# Altium schematic symbol library TSW-104-08-G-D-RA.SchLib: 1 symbol
Pins are listed as number, name and electrical type; pins without a type are passive.

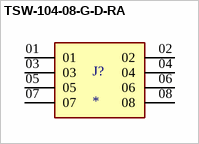
[diagram p0: symbol TSW-104-08-G-D-RA]

## TSW-104-08-G-D-RA
designator J?
MP: TSW-104-08-G-D-RA; MF: Samtec; Package: None; Value: *; Price: None; Availability: Unavailable
footprint SAMTEC_TSW-104-08-G-D-RA
pins: 01, 02, 03, 04, 05, 06, 07, 08